# Altium schematic symbol library Schlib.SchLib: 9 symbols
Pins are listed as number, name and electrical type; pins without a type are passive.

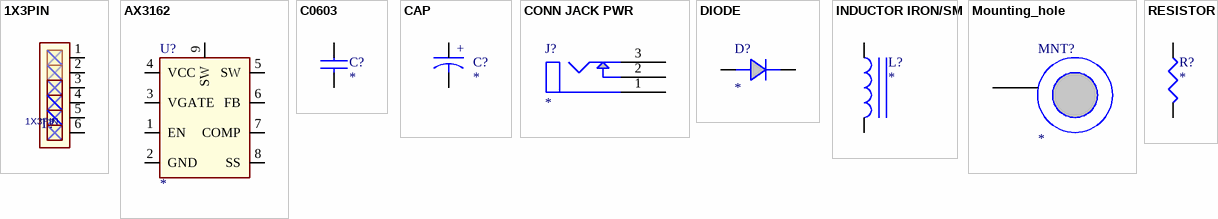
[diagram p0: symbols 1X3PIN to RESISTOR]

## 1X3PIN
designator T?
pins: 1, 2, 3, 4, 5, 6

## AX3162
designator U?
pins: 1 EN, 2 GND, 3 VGATE, 4 VCC, 5 SW, 6 FB, 7 COMP, 8 SS, 9 SW

## C0603
designator C?
Mount Status: Surface Mount; RoHS Compliant: Yes
pins: 1, 2

## CAP
designator C?
pins: 1, 2
text: +

## CONN JACK PWR
designator J?
pins: 1, 2, 3

## DIODE
designator D?
pins: 1 K, 2 A

## INDUCTOR IRON/SM
designator L?
pins: 1, 2

## Mounting_hole
designator MNT?
footprint TH
pins: 1

## RESISTOR
designator R?
pins: 1, 2